# EAGLE library part IC_ADC_ADS7041 (library dp_devices.v6)
Ultra-low power 10-Bit 1-MSPS SAR ADC
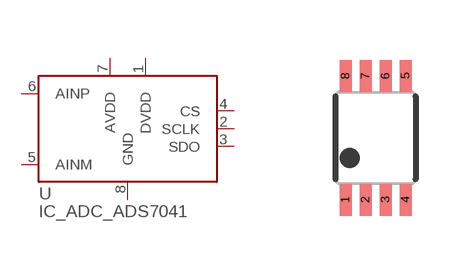
[diagram p212: symbol with the pads of VSSOP-8_DCU_PDSO_G8; footprint VSSOP-8_DCU_PDSO_G8]

Designator prefix U

## IC_ADC_ADS7041  [VSSOP-8_DCU_PDSO_G8]
1  DVDD  pwr
2  SCLK  in
3  SDO
4  CS  in
5  AINM  in
6  AINP  in
7  AVDD
8  GND  pwr

## Footprint VSSOP-8_DCU_PDSO_G8 (pad centres in mm)
Texas Instruments version of VSSOP-8 Body: 2 x 2.3 Pitch: 0.5
smd 0.3 x 0.8: 1 -0.75,-1.55; 2 -0.25,-1.55; 3 0.25,-1.55; 4 0.75,-1.55; 5 0.75,1.55; 6 0.25,1.55; 7 -0.25,1.55; 8 -0.75,1.55